# Altium schematic symbol library TPS3840PH30DBVR.SchLib: 1 symbol
Pins are listed as number, name and electrical type; pins without a type are passive.

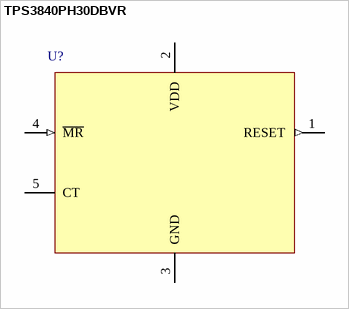
[diagram p0: symbol TPS3840PH30DBVR]

## TPS3840PH30DBVR
designator U?
Nanopower voltage supervisor, 3.0V threshold, push-pull active-high reset, SOT-23-5
pins: 1 RESET (out), 2 VDD (power), 3 GND (power), 4 ~{MR} (in), 5 CT